# Altium footprint library STPMotorControl_1.PcbLib: 81 footprints (part 2 of 6)
Each footprint in its own frame and in the unit in brackets; x right, y up, seen from the top. Pads: shape width x height; smd on the part's side, far side on the other; paste and mask are expansions set on the pad; w line width, h text height; cw(c..) or ccw(c..) is an arc to the next point about the centre after c.
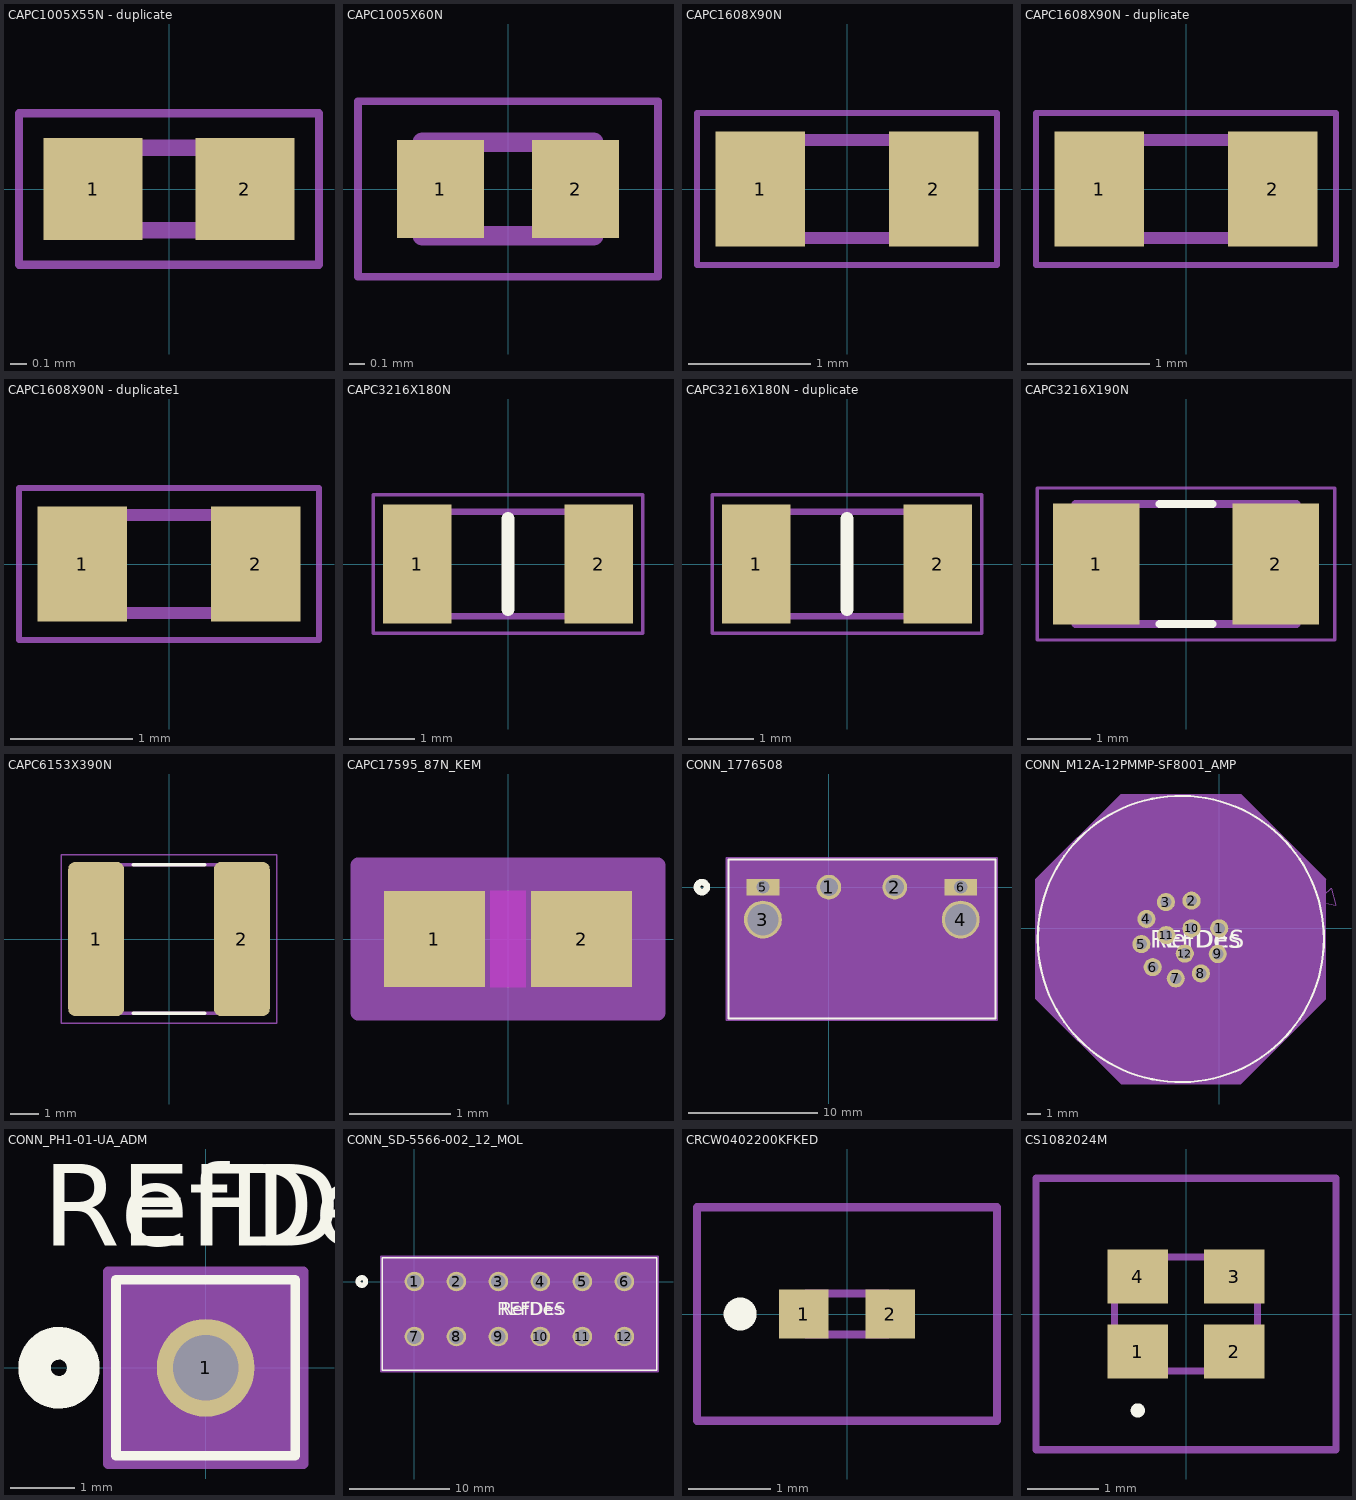
[diagram p1: the footprints below, top view; thin cyan lines are the x and y axes]

## CAPC1005X55N - duplicate [mm]
pads (2):
  rect 0.6x0.62 smd: 1(-0.46,0) 2(0.46,0)
Mechanical 15:
  lines w0.1: -0.5,-0.25 -0.5,0.25 0.5,0.25 0.5,-0.25 -0.5,-0.25
Mechanical 20:
  lines w0.05: -0.91,-0.46 -0.91,0.46 0.91,0.46 0.91,-0.46 -0.91,-0.46
3D body "CL05B104KO5NNNC.stp": height 0.55, standoff 0, extent -0.5,-0.25 0.5,0.25

## CAPC1005X60N [mm]
pads (2):
  rect 0.56x0.63 smd paste+0 mask+0.102: 1(-0.435,0) 2(0.435,0)
Mechanical 13:
  lines w0.127: -0.55,-0.3 -0.55,0.3 0.55,0.3 0.55,-0.3 -0.55,-0.3
Mechanical 15:
  lines w0.05: -0.965,-0.565 -0.965,0.565 0.965,0.565 0.965,-0.565 -0.965,-0.565
3D body "step_temp.STEP": height 0.6, standoff 0, extent -0.5,-0.25 0.5,0.25

## CAPC1608X90N [mm]
pads (2):
  rect 0.73x0.94 smd: 1(-0.71,0) 2(0.71,0)
Mechanical 15:
  lines w0.1: -0.8,-0.4 0.8,-0.4 0.8,0.4 -0.8,0.4 -0.8,-0.4
Mechanical 20:
  lines w0.05: -1.225,-0.62 1.225,-0.62 1.225,0.62 -1.225,0.62 -1.225,-0.62
3D body "CL10A475KP8NNNC.stp": height 0.9, standoff 0, extent -0.8,-0.4 0.8,0.4

## CAPC1608X90N - duplicate [mm]
pads (2):
  rect 0.73x0.94 smd: 1(-0.71,0) 2(0.71,0)
Mechanical 15:
  lines w0.1: -0.8,-0.4 -0.8,0.4 0.8,0.4 0.8,-0.4 -0.8,-0.4
Mechanical 20:
  lines w0.05: -1.225,-0.62 -1.225,0.62 1.225,0.62 1.225,-0.62 -1.225,-0.62
3D body "CL10A225KP8NNNC.stp": height 0.9, standoff 0, extent -0.8,-0.4 0.8,0.4

## CAPC1608X90N - duplicate1 [mm]
pads (2):
  rect 0.73x0.94 smd: 1(-0.71,0) 2(0.71,0)
Mechanical 15:
  lines w0.1: -0.8,-0.4 0.8,-0.4 0.8,0.4 -0.8,0.4 -0.8,-0.4
Mechanical 20:
  lines w0.05: -1.225,-0.62 1.225,-0.62 1.225,0.62 -1.225,0.62 -1.225,-0.62

## CAPC3216X180N [mm]
pads (2):
  rect 1.05x1.82 smd: 1(-1.39,0) 2(1.39,0)
Top Overlay:
  lines w0.2: 0,-0.7 0,0.7
Mechanical 15:
  lines w0.1: -1.6,-0.8 -1.6,0.8 1.6,0.8 1.6,-0.8 -1.6,-0.8
Mechanical 20:
  lines w0.05: -2.065,-1.06 -2.065,1.06 2.065,1.06 2.065,-1.06 -2.065,-1.06
3D body "CL31A107MQHNNWE.stp": height 1.8, standoff 0, extent -1.6,-0.8 1.6,0.8

## CAPC3216X180N - duplicate [mm]
pads (2):
  rect 1.05x1.82 smd: 1(-1.39,0) 2(1.39,0)
Top Overlay:
  lines w0.2: 0,-0.7 0,0.7
Mechanical 13:
  lines w0.1: -1.6,-0.8 1.6,-0.8 1.6,0.8 -1.6,0.8 -1.6,-0.8
Mechanical 15:
  lines w0.05: -2.065,-1.06 2.065,-1.06 2.065,1.06 -2.065,1.06 -2.065,-1.06
3D body "CL31A106MAHNNNE.stp": height 1.8, standoff 0, extent -1.6,-0.8 1.6,0.8

## CAPC3216X190N [mm]
pads (2):
  rect 1.37x1.91 smd paste+0 mask+0.102: 1(-1.421,0) 2(1.421,0)
Top Overlay:
  lines w0.127: -0.42,-0.95 0.42,-0.95 ; -0.42,0.95 0.42,0.95
Mechanical 13:
  lines w0.127: -1.75,-0.95 -1.75,0.95 1.75,0.95 1.75,-0.95 -1.75,-0.95
Mechanical 15:
  lines w0.05: -2.355,-1.205 -2.355,1.205 2.355,1.205 2.355,-1.205 -2.355,-1.205
3D body "step_temp.STEP": height 1.9, standoff 0, extent -1.6,-0.8 1.6,0.8

## CAPC6153X390N [mm]
height 3.9
pads (2):
  rrect25% 2x5.52 smd: 1(-2.605,0) 2(2.605,0)
Top Overlay:
  lines w0.127: -1.285,-2.65 1.285,-2.65 ; -1.285,2.65 1.285,2.65
Mechanical 13:
  lines w0.127: -3.05,-2.65 3.05,-2.65 3.05,2.65 -3.05,2.65 -3.05,-2.65
Mechanical 15:
  lines w0.05: -3.855,-3.01 -3.855,3.01 3.855,3.01 3.855,-3.01 -3.855,-3.01
3D body "step_temp.STEP": height 3.9, standoff 0, extent -3.05,-2.65 3.05,2.65

## CAPC17595_87N_KEM [mm]
pads (2):
  rect 1x0.95 smd paste+0 mask+0: 1(-0.725,0) 2(0.725,0)
Top Layer keep-out:
  region: -0.174,-0.424 -0.174,0.424 0.174,0.424 0.174,-0.424
Top Overlay:
  text ".Designator" at -3.492,-0.635 h1.27
Keep-Out Layer:
  region: -0.174,-0.475 -0.174,0.475 0.174,0.475 0.174,-0.475
Mechanical 13:
  lines w0.025: -0.875,-0.475 -0.875,0.475 ; -0.875,-0.475 -0.375,-0.475 -0.375,0.475 -0.875,0.475 ; -0.875,-0.475 0.875,-0.475 ; -0.875,-0.475 -0.875,0.475 ; -0.875,0.475 0.875,0.475 ; 0.875,-0.475 0.375,-0.475 0.375,0.475 0.875,0.475 ; 0.875,-0.475 0.875,0.475 ; 0.875,-0.475 0.875,0.475
  text ".Designator" at -3.492,-0.635 h1.27
Mechanical 15:
  region: 1.479,-0.729 -1.479,-0.729 -1.479,0.729 1.479,0.729
  lines w0.152: -1.479,-0.729 -1.479,0.729 1.479,0.729 1.479,-0.729 -1.479,-0.729
3D body "CAPC17595_87N_KEM.step": height 0.87, standoff 0, extent -0.875,-0.475 0.875,0.475

## CONN_1776508 [mil]
pads (6):
  round 75 hole 55 paste-99999 mask+0: 1(0,0) 2(200,0)
  round 115 hole 95 paste-99999 mask+0: 3(-200,-98.43) 4(400,-98.43)
  rect 100x50 hole 40 paste-99999 mask+0: 5(-200,0) 6(400,0)
Top Overlay:
  circle w20: c-385,0 r15
  lines w6: -305,-398.26 505,-398.26 505,83.74 -305,83.74 -305,-398.26
  text ".Designator" at -37.5,-25 h50
Bottom Overlay:
  circle w20: c-385,0 r15
Mechanical 13:
  circle w20: c0,0 r15
  lines w1: -300,-393.26 500,-393.26 500,78.74 -300,78.74 -300,-393.26
  text ".Designator" at -37.5,-25 h50
Mechanical 15:
  region: 510,88.74 -310,88.74 -310,-403.26 510,-403.26
  lines w6: -310,-403.26 -310,88.74 510,88.74 510,-403.26 -310,-403.26

## CONN_M12A-12PMMP-SF8001_AMP [mil]
pads (12):
  round 52 / inner round 60 / far side round 52 hole 32 paste-99999 mask+0: 1(0,0) 2(-79.51,79.51) 3(-153.02,75.26) 4(-208.65,27.01) 5(-223.25,-45.17) 6(-190.75,-111.24) 7(-124.68,-143.74) 8(-52.5,-129.14) 9(-4.25,-73.51) 10(-79.4,0.11) 11(-151.85,-19.3) 12(-98.81,-72.34)
Top Overlay:
  circle w6: c-110.02,-30.51 r410.5
  text "REFDES" at -197.52,-55.51 h50
  text "RefDes" at -185.02,-55.51 h50
Mechanical 13:
  circle w0: c-110.02,-30.51 r405.5
  lines w1: 280.73,77.85 334.92,66.98 321.58,115.09 280.73,77.85
  text "RefDes2" at -197.52,-55.51 h50
Mechanical 15:
  region: -525.52,140.58 -281.11,384.99 61.07,384.99 305.48,140.58 305.48,-201.6 61.07,-446.01 -281.11,-446.01 -525.52,-201.6
  lines w1: -525.52,-201.6 -525.52,140.58 -281.11,384.99 61.07,384.99 305.48,140.58 305.48,-201.6 61.07,-446.01 -281.11,-446.01 -525.52,-201.6

## CONN_PH1-01-UA_ADM [mil]
pads (1):
  round 60 hole 40 paste-99999 mask+0: 1(0,0)
Top Overlay:
  circle w20: c-90,0 r15
  lines w6: -55,-54 55,-54 55,54 -55,54 -55,-54
  text "RefDes" at -100,75 h50
  text "REFDES" at -100,75 h50
Bottom Overlay:
  circle w20: c-90,0 r15
Mechanical 13:
  circle w20: c0,0 r15
  lines w1: -50,-49 50,-49 50,49 -50,49 -50,-49
  text "RefDes2" at -100,75 h50
Mechanical 15:
  region: 60,59 -60,59 -60,-59 60,-59
  lines w6: -60,-59 -60,59 60,59 60,-59 -60,-59

## CONN_SD-5566-002_12_MOL [mil]
pads (12):
  round 77 / inner round 60 / far side round 77 hole 57 paste-99999 mask+0: 1(0,0) 2(165.35,0) 3(330.71,0) 4(496.06,0) 5(661.42,0) 6(826.77,0) 7(0,-216.54) 8(165.35,-216.54) 9(330.71,-216.54) 10(496.06,-216.54) 11(661.42,-216.54) 12(826.77,-216.54)
Top Overlay:
  circle w20: c-207.11,0 r15
  lines w6: -127.11,-349.42 953.89,-349.42 953.89,93.58 -127.11,93.58 -127.11,-349.42
  text "RefDes" at 338.39,-133.27 h50
  text "REFDES" at 325.89,-133.27 h50
Bottom Overlay:
  circle w20: c-207.11,0 r15
Mechanical 13:
  circle w20: c0,0 r15
  lines w1: -122.11,-344.42 948.89,-344.42 948.89,88.58 -122.11,88.58 -122.11,-344.42
  text "RefDes2" at 325.89,-133.27 h50
Mechanical 15:
  region: 958.89,98.58 -132.11,98.58 -132.11,-354.42 958.89,-354.42
  lines w6: -132.11,-354.42 -132.11,98.58 958.89,98.58 958.89,-354.42 -132.11,-354.42

## CRCW0402200KFKED [mm]
pads (2):
  rect 0.6x0.6 smd: 1(-0.525,0) 2(0.525,0)
Top Overlay:
  lines w0.2: -1.3,-0.1 cw(c-1.3,0) -1.3,0.1 cw(c-1.3,0) -1.3,-0.1
Mechanical 13:
  lines w0.1: -0.5,-0.25 0.5,-0.25 0.5,0.25 -0.5,0.25 -0.5,-0.25
Mechanical 15:
  lines w0.1: -1.825,-1.3 1.825,-1.3 1.825,1.3 -1.825,1.3 -1.825,-1.3
3D body "CRCW040222R0FKED.stp": height 0.35, standoff 0, extent -0.5,-0.25 0.5,0.25

## CS1082024M [mm]
pads (4):
  rect 0.85x0.75 smd: 1(-0.675,-0.525) 2(0.675,-0.525) 3(0.675,0.525) 4(-0.675,0.525)
Top Overlay:
  lines w0.1: -0.675,-1.4 cw(c-0.675,-1.35) -0.675,-1.3 cw(c-0.675,-1.35) -0.675,-1.4
Mechanical 15:
  lines w0.1: -1,-0.8 -1,0.8 1,0.8 1,-0.8 -1,-0.8
Mechanical 20:
  lines w0.1: -2.1,-1.9 -2.1,1.9 2.1,1.9 2.1,-1.9 -2.1,-1.9
3D body "CS10820-24M.stp": height 0.6, standoff 0, extent -1.015,-0.818 1.035,0.832